# EAGLE library part IC_UC_STM32F103ZX (library dp_devices.v6)
STM32F103ZX High-density performance line ARM based 32-bit MCU
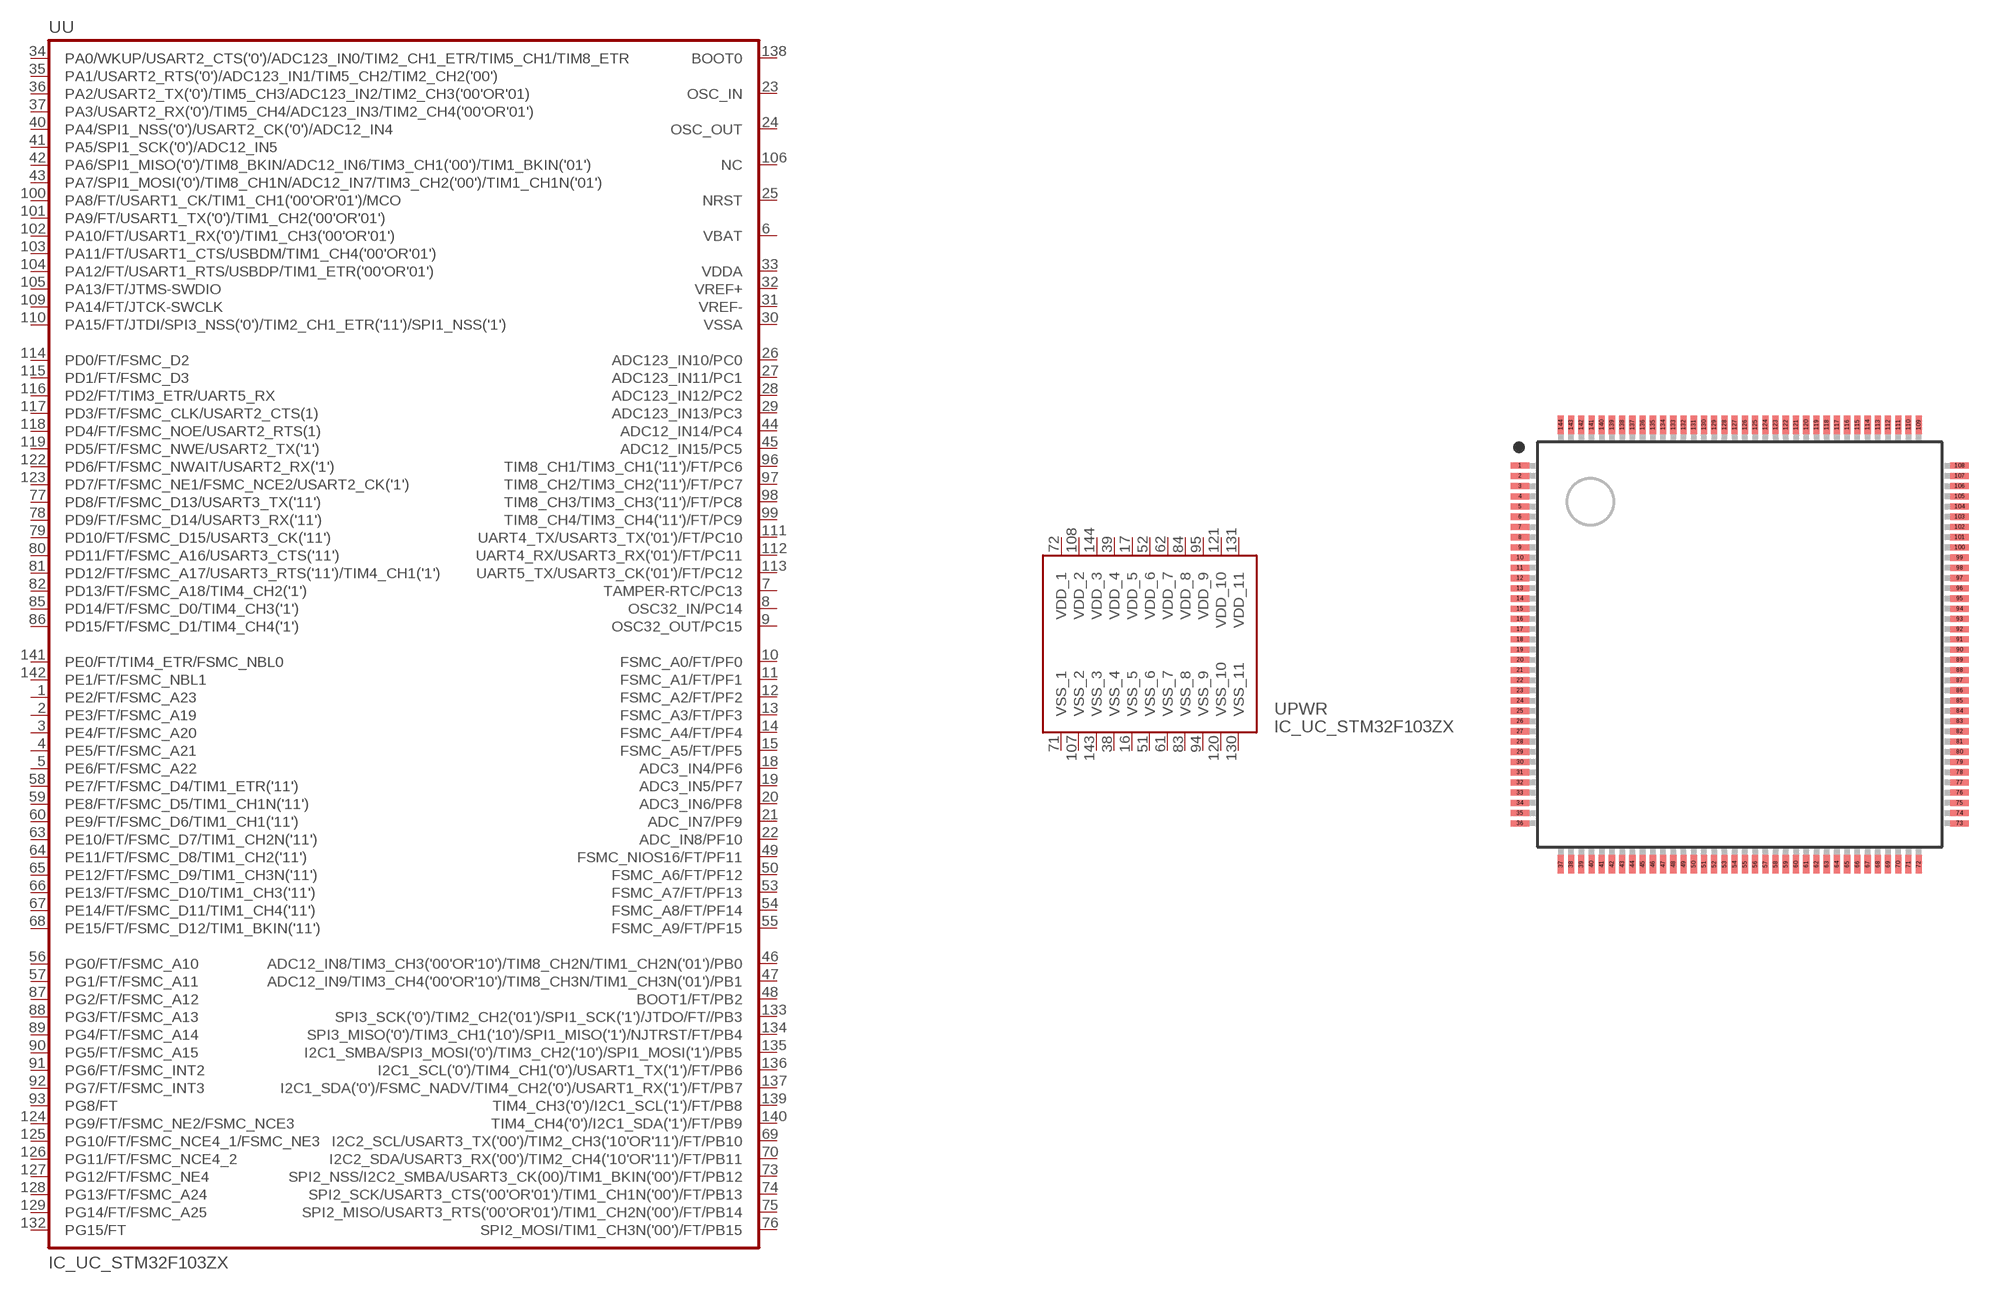
[diagram p201: symbol with the pads of TQFP-144; footprint TQFP-144]

Designator prefix U; gates U=STM32F103ZX PWR=STM32F103ZX_PWR

## IC_UC_STM32F103ZX  [TQFP-144]
1  U:PE2/FT/FSMC_A23
2  U:PE3/FT/FSMC_A19
3  U:PE4/FT/FSMC_A20
4  U:PE5/FT/FSMC_A21
5  U:PE6/FT/FSMC_A22
6  U:VBAT  sup
7  U:TAMPER-RTC/PC13
8  U:OSC32_IN/PC14
9  U:OSC32_OUT/PC15
10  U:FSMC_A0/FT/PF0
11  U:FSMC_A1/FT/PF1
12  U:FSMC_A2/FT/PF2
13  U:FSMC_A3/FT/PF3
14  U:FSMC_A4/FT/PF4
15  U:FSMC_A5/FT/PF5
16  PWR:VSS_5  pwr
17  PWR:VDD_5  pwr
18  U:ADC3_IN4/PF6
19  U:ADC3_IN5/PF7
20  U:ADC3_IN6/PF8
21  U:ADC_IN7/PF9
22  U:ADC_IN8/PF10
23  U:OSC_IN  in
24  U:OSC_OUT  out
25  U:NRST
26  U:ADC123_IN10/PC0
27  U:ADC123_IN11/PC1
28  U:ADC123_IN12/PC2
29  U:ADC123_IN13/PC3
30  U:VSSA  sup
31  U:VREF-  sup
32  U:VREF+  sup
33  U:VDDA  sup
34  U:PA0/WKUP/USART2_CTS('0')/ADC123_IN0/TIM2_CH1_ETR/TIM5_CH1/TIM8_ETR
35  U:PA1/USART2_RTS('0')/ADC123_IN1/TIM5_CH2/TIM2_CH2('00')
36  U:PA2/USART2_TX('0')/TIM5_CH3/ADC123_IN2/TIM2_CH3('00'OR'01)
37  U:PA3/USART2_RX('0')/TIM5_CH4/ADC123_IN3/TIM2_CH4('00'OR'01')
38  PWR:VSS_4  pwr
39  PWR:VDD_4  pwr
40  U:PA4/SPI1_NSS('0')/USART2_CK('0')/ADC12_IN4
41  U:PA5/SPI1_SCK('0')/ADC12_IN5
42  U:PA6/SPI1_MISO('0')/TIM8_BKIN/ADC12_IN6/TIM3_CH1('00')/TIM1_BKIN('01')
43  U:PA7/SPI1_MOSI('0')/TIM8_CH1N/ADC12_IN7/TIM3_CH2('00')/TIM1_CH1N('01')
44  U:ADC12_IN14/PC4
45  U:ADC12_IN15/PC5
46  U:ADC12_IN8/TIM3_CH3('00'OR'10')/TIM8_CH2N/TIM1_CH2N('01')/PB0
47  U:ADC12_IN9/TIM3_CH4('00'OR'10')/TIM8_CH3N/TIM1_CH3N('01')/PB1
48  U:BOOT1/FT/PB2
49  U:FSMC_NIOS16/FT/PF11
50  U:FSMC_A6/FT/PF12
51  PWR:VSS_6  pwr
52  PWR:VDD_6  pwr
53  U:FSMC_A7/FT/PF13
54  U:FSMC_A8/FT/PF14
55  U:FSMC_A9/FT/PF15
56  U:PG0/FT/FSMC_A10
57  U:PG1/FT/FSMC_A11
58  U:PE7/FT/FSMC_D4/TIM1_ETR('11')
59  U:PE8/FT/FSMC_D5/TIM1_CH1N('11')
60  U:PE9/FT/FSMC_D6/TIM1_CH1('11')
61  PWR:VSS_7  pwr
62  PWR:VDD_7  pwr
63  U:PE10/FT/FSMC_D7/TIM1_CH2N('11')
64  U:PE11/FT/FSMC_D8/TIM1_CH2('11')
65  U:PE12/FT/FSMC_D9/TIM1_CH3N('11')
66  U:PE13/FT/FSMC_D10/TIM1_CH3('11')
67  U:PE14/FT/FSMC_D11/TIM1_CH4('11')
68  U:PE15/FT/FSMC_D12/TIM1_BKIN('11')
69  U:I2C2_SCL/USART3_TX('00')/TIM2_CH3('10'OR'11')/FT/PB10
70  U:I2C2_SDA/USART3_RX('00')/TIM2_CH4('10'OR'11')/FT/PB11
71  PWR:VSS_1  pwr
72  PWR:VDD_1  pwr
73  U:SPI2_NSS/I2C2_SMBA/USART3_CK(00)/TIM1_BKIN('00')/FT/PB12
74  U:SPI2_SCK/USART3_CTS('00'OR'01')/TIM1_CH1N('00')/FT/PB13
75  U:SPI2_MISO/USART3_RTS('00'OR'01')/TIM1_CH2N('00')/FT/PB14
76  U:SPI2_MOSI/TIM1_CH3N('00')/FT/PB15
77  U:PD8/FT/FSMC_D13/USART3_TX('11')
78  U:PD9/FT/FSMC_D14/USART3_RX('11')
79  U:PD10/FT/FSMC_D15/USART3_CK('11')
80  U:PD11/FT/FSMC_A16/USART3_CTS('11')
81  U:PD12/FT/FSMC_A17/USART3_RTS('11')/TIM4_CH1('1')
82  U:PD13/FT/FSMC_A18/TIM4_CH2('1')
83  PWR:VSS_8  pwr
84  PWR:VDD_8  pwr
85  U:PD14/FT/FSMC_D0/TIM4_CH3('1')
86  U:PD15/FT/FSMC_D1/TIM4_CH4('1')
87  U:PG2/FT/FSMC_A12
88  U:PG3/FT/FSMC_A13
89  U:PG4/FT/FSMC_A14
90  U:PG5/FT/FSMC_A15
91  U:PG6/FT/FSMC_INT2
92  U:PG7/FT/FSMC_INT3
93  U:PG8/FT
94  PWR:VSS_9  pwr
95  PWR:VDD_9  pwr
96  U:TIM8_CH1/TIM3_CH1('11')/FT/PC6
97  U:TIM8_CH2/TIM3_CH2('11')/FT/PC7
98  U:TIM8_CH3/TIM3_CH3('11')/FT/PC8
99  U:TIM8_CH4/TIM3_CH4('11')/FT/PC9
100  U:PA8/FT/USART1_CK/TIM1_CH1('00'OR'01')/MCO
101  U:PA9/FT/USART1_TX('0')/TIM1_CH2('00'OR'01')
102  U:PA10/FT/USART1_RX('0')/TIM1_CH3('00'OR'01')
103  U:PA11/FT/USART1_CTS/USBDM/TIM1_CH4('00'OR'01')
104  U:PA12/FT/USART1_RTS/USBDP/TIM1_ETR('00'OR'01')
105  U:PA13/FT/JTMS-SWDIO
106  U:NC  nc
107  PWR:VSS_2  pwr
108  PWR:VDD_2  pwr
109  U:PA14/FT/JTCK-SWCLK
110  U:PA15/FT/JTDI/SPI3_NSS('0')/TIM2_CH1_ETR('11')/SPI1_NSS('1')
111  U:UART4_TX/USART3_TX('01')/FT/PC10
112  U:UART4_RX/USART3_RX('01')/FT/PC11
113  U:UART5_TX/USART3_CK('01')/FT/PC12
114  U:PD0/FT/FSMC_D2
115  U:PD1/FT/FSMC_D3
116  U:PD2/FT/TIM3_ETR/UART5_RX
117  U:PD3/FT/FSMC_CLK/USART2_CTS(1)
118  U:PD4/FT/FSMC_NOE/USART2_RTS(1)
119  U:PD5/FT/FSMC_NWE/USART2_TX('1')
120  PWR:VSS_10  pwr
121  PWR:VDD_10  pwr
122  U:PD6/FT/FSMC_NWAIT/USART2_RX('1')
123  U:PD7/FT/FSMC_NE1/FSMC_NCE2/USART2_CK('1')
124  U:PG9/FT/FSMC_NE2/FSMC_NCE3
125  U:PG10/FT/FSMC_NCE4_1/FSMC_NE3
126  U:PG11/FT/FSMC_NCE4_2
127  U:PG12/FT/FSMC_NE4
128  U:PG13/FT/FSMC_A24
129  U:PG14/FT/FSMC_A25
130  PWR:VSS_11  pwr
131  PWR:VDD_11  pwr
132  U:PG15/FT
133  U:SPI3_SCK('0')/TIM2_CH2('01')/SPI1_SCK('1')/JTDO/FT//PB3
134  U:SPI3_MISO('0')/TIM3_CH1('10')/SPI1_MISO('1')/NJTRST/FT/PB4
135  U:I2C1_SMBA/SPI3_MOSI('0')/TIM3_CH2('10')/SPI1_MOSI('1')/PB5
136  U:I2C1_SCL('0')/TIM4_CH1('0')/USART1_TX('1')/FT/PB6
137  U:I2C1_SDA('0')/FSMC_NADV/TIM4_CH2('0')/USART1_RX('1')/FT/PB7
138  U:BOOT0  in
139  U:TIM4_CH3('0')/I2C1_SCL('1')/FT/PB8
140  U:TIM4_CH4('0')/I2C1_SDA('1')/FT/PB9
141  U:PE0/FT/TIM4_ETR/FSMC_NBL0
142  U:PE1/FT/FSMC_NBL1
143  PWR:VSS_3  pwr
144  PWR:VDD_3  pwr

## Footprint TQFP-144 (pad centres in mm)
smd 0.9 x 0.3: 1 -10.75,8.75; 2 -10.75,8.25; 3 -10.75,7.75; 4 -10.75,7.25; 5 -10.75,6.75; 6 -10.75,6.25; 7 -10.75,5.75; 8 -10.75,5.25; 9 -10.75,4.75; 10 -10.75,4.25; 11 -10.75,3.75; 12 -10.75,3.25; 13 -10.75,2.75; 14 -10.75,2.25; 15 -10.75,1.75; 16 -10.75,1.25; 17 -10.75,0.75; 18 -10.75,0.25; 19 -10.75,-0.25; 20 -10.75,-0.75; 21 -10.75,-1.25; 22 -10.75,-1.75; 23 -10.75,-2.25; 24 -10.75,-2.75; 25 -10.75,-3.25; 26 -10.75,-3.75; 27 -10.75,-4.25; 28 -10.75,-4.75; 29 -10.75,-5.25; 30 -10.75,-5.75; 31 -10.75,-6.25; 32 -10.75,-6.75; 33 -10.75,-7.25; 34 -10.75,-7.75; 35 -10.75,-8.25; 36 -10.75,-8.75; 73 10.75,-8.75; 74 10.75,-8.25; 75 10.75,-7.75; 76 10.75,-7.25; 77 10.75,-6.75; 78 10.75,-6.25; 79 10.75,-5.75; 80 10.75,-5.25; 81 10.75,-4.75; 82 10.75,-4.25; 83 10.75,-3.75; 84 10.75,-3.25; 85 10.75,-2.75; 86 10.75,-2.25; 87 10.75,-1.75; 88 10.75,-1.25; 89 10.75,-0.75; 90 10.75,-0.25; 91 10.75,0.25; 92 10.75,0.75; 93 10.75,1.25; 94 10.75,1.75; 95 10.75,2.25; 96 10.75,2.75; 97 10.75,3.25; 98 10.75,3.75; 99 10.75,4.25; 100 10.75,4.75; 101 10.75,5.25; 102 10.75,5.75; 103 10.75,6.25; 104 10.75,6.75; 105 10.75,7.25; 106 10.75,7.75; 107 10.75,8.25; 108 10.75,8.75
smd 0.3 x 0.9: 37 -8.75,-10.75; 38 -8.25,-10.75; 39 -7.75,-10.75; 40 -7.25,-10.75; 41 -6.75,-10.75; 42 -6.25,-10.75; 43 -5.75,-10.75; 44 -5.25,-10.75; 45 -4.75,-10.75; 46 -4.25,-10.75; 47 -3.75,-10.75; 48 -3.25,-10.75; 49 -2.75,-10.75; 50 -2.25,-10.75; 51 -1.75,-10.75; 52 -1.25,-10.75; 53 -0.75,-10.75; 54 -0.25,-10.75; 55 0.25,-10.75; 56 0.75,-10.75; 57 1.25,-10.75; 58 1.75,-10.75; 59 2.25,-10.75; 60 2.75,-10.75; 61 3.25,-10.75; 62 3.75,-10.75; 63 4.25,-10.75; 64 4.75,-10.75; 65 5.25,-10.75; 66 5.75,-10.75; 67 6.25,-10.75; 68 6.75,-10.75; 69 7.25,-10.75; 70 7.75,-10.75; 71 8.25,-10.75; 72 8.75,-10.75; 109 8.75,10.75; 110 8.25,10.75; 111 7.75,10.75; 112 7.25,10.75; 113 6.75,10.75; 114 6.25,10.75; 115 5.75,10.75; 116 5.25,10.75; 117 4.75,10.75; 118 4.25,10.75; 119 3.75,10.75; 120 3.25,10.75; 121 2.75,10.75; 122 2.25,10.75; 123 1.75,10.75; 124 1.25,10.75; 125 0.75,10.75; 126 0.25,10.75; 127 -0.25,10.75; 128 -0.75,10.75; 129 -1.25,10.75; 130 -1.75,10.75; 131 -2.25,10.75; 132 -2.75,10.75; 133 -3.25,10.75; 134 -3.75,10.75; 135 -4.25,10.75; 136 -4.75,10.75; 137 -5.25,10.75; 138 -5.75,10.75; 139 -6.25,10.75; 140 -6.75,10.75; 141 -7.25,10.75; 142 -7.75,10.75; 143 -8.25,10.75; 144 -8.75,10.75